# Altium schematic symbol library 2020-12-04_16-24-54.SchLib: 2 symbols
Pins are listed as number, name and electrical type; pins without a type are passive.

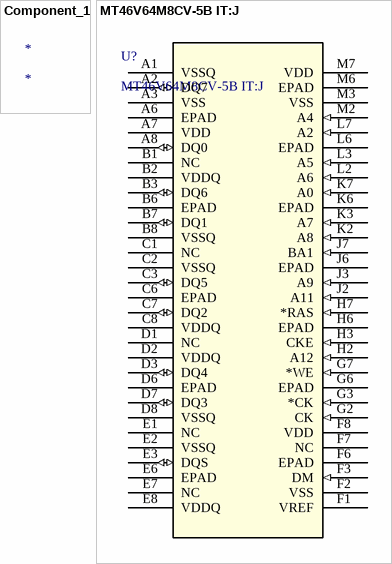
[diagram p0: symbols Component_1 to MT46V64M8CV-5B IT:J]

## Component_1
designator *

## MT46V64M8CV-5B IT:J
designator U?
No Description Available; Vendor: Micron; Built_By: EMA_Jessica; SourceLibrary: Micron_2018-04-06; Manufacturer_Part_Number: MT46V64M8CV-5B IT:J; Copyright: Copyright (C) 2016 Accelerated Designs. All rights reserved; RefDes: RefDes; Type: DEV
footprint FBGA60_10X12P5_MRN
pins: A1 VSSQ (power), A2 DQ7 (io), A3 VSS (power), A6 EPAD, A7 VDD (power), A8 DQ0 (io), B1 NC, B2 VDDQ (power), B3 DQ6 (io), B6 EPAD, B7 DQ1 (io), B8 VSSQ (power), C1 NC, C2 VSSQ (power), C3 DQ5 (io), C6 EPAD, C7 DQ2 (io), C8 VDDQ (power), D1 NC, D2 VDDQ (power), D3 DQ4 (io), D6 EPAD, D7 DQ3 (io), D8 VSSQ (power), E1 NC, E2 VSSQ (power), E3 DQS (io), E6 EPAD, E7 NC, E8 VDDQ (power), F1 VREF (power), F2 VSS (power), F3 DM (in), F6 EPAD, F7 NC, F8 VDD (power), G2 CK (in), G3 *CK (in), G6 EPAD, G7 *WE (in), H2 A12 (in), H3 CKE (in), H6 EPAD, H7 *RAS (in), J2 A11 (in), J3 A9 (in), J6 EPAD, J7 BA1 (in), K2 A8 (in), K3 A7 (in), K6 EPAD, K7 A0 (in), L2 A6 (in), L3 A5 (in), L6 EPAD, L7 A2 (in), M2 A4 (in), M3 VSS (power), M6 EPAD, M7 VDD (power)